# Altium schematic symbol library MTGW_R09.SCHLIB: 89 symbols
Pins are listed as number, name and electrical type; pins without a type are passive.

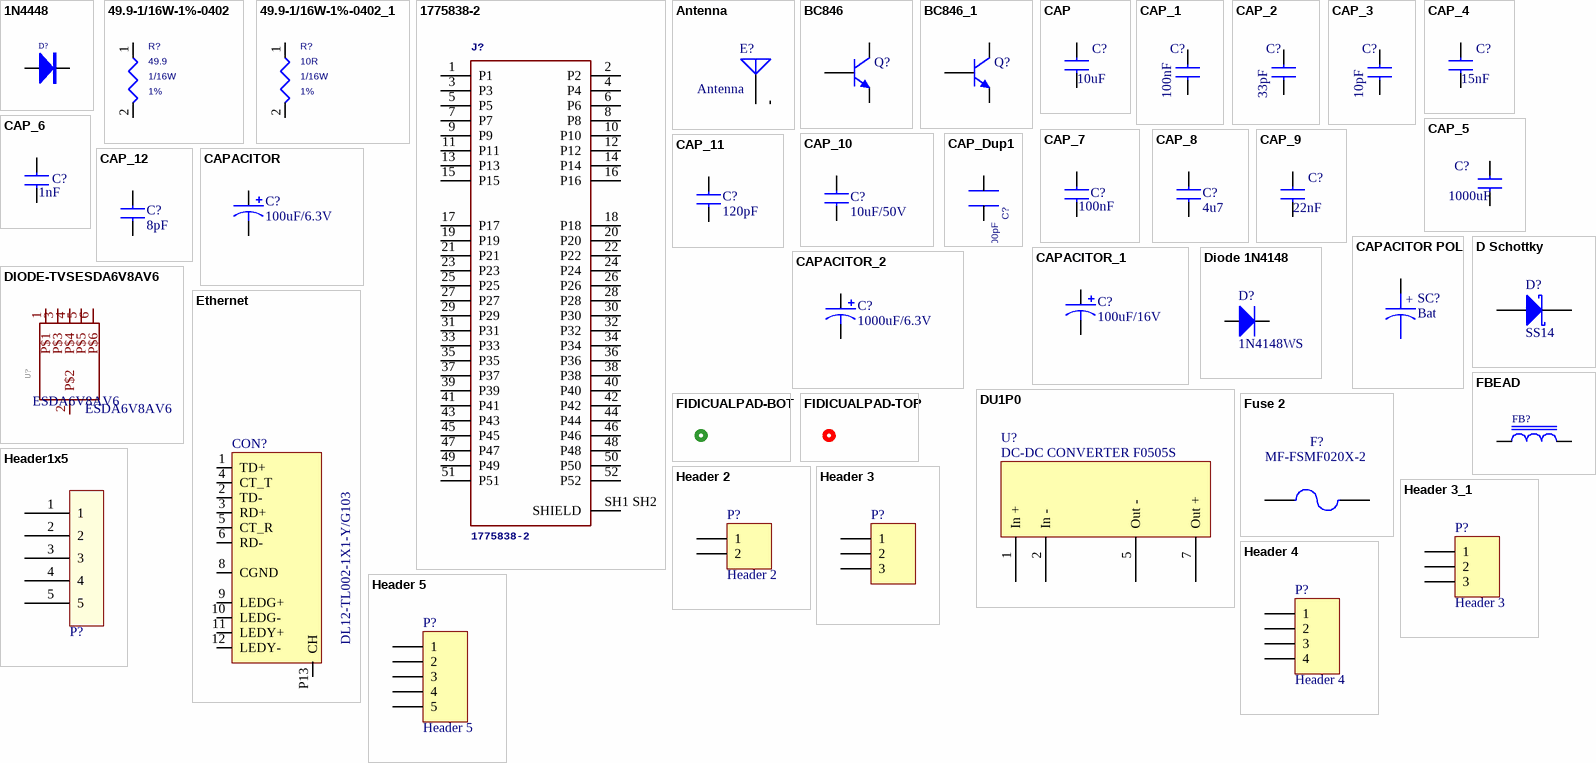
[diagram p0: symbols 1N4448 to Header 5]

## 1N4448
designator D?
Diode; Part Number: LL4148-HT; Unit: USD; Price: 0,01053; Ordering: https://www.ozdisan.com/guc-yari-iletkenleri/diyot-modul-diyot-dogrultucular/genel-amacli-diyotlar/LL4148-HT
simulation model 1N4448 (DIODE)
footprint MLL34
footprint DIOMELF3515M (Metal Electrode Face (MELF) Diode; Body 3.5 x 1.5 mm (LxDia))
pins: A, C K
1 alternate drawing of the same symbol

## 49.9-1/16W-1%-0402
designator R?, comment 49.9  Tolerance: 1%  Wattage: 1/16W
Part Number: 0603SAF499JT5E; Unit: USD; Ordering: https://www.ozdisan.com/pasif-komponentler/direncler/smt-smd-direncler/0603SAF499JT5E; Price: 0,00195
footprint RESC1608X84M (Chip Resistor, Body 1.6x0.8mm, IPC Low Density)
pins: 1, 2

## 49.9-1/16W-1%-0402_1
designator R?, comment 10R  Tolerance: 1%  Wattage: 1/16W
Part Number: 0603SAF100JT5E; Unit: USD; Ordering: https://www.ozdisan.com/pasif-komponentler/direncler/smt-smd-direncler/0603SAF100JT5E; Price: 0,00195
footprint RESC1608X84M (Chip Resistor, Body 1.6x0.8mm, IPC Low Density)
pins: 1, 2

## 1775838-2
designator J?
Conn Mini PCI Express Card Edge SKT 52 POS Solder RA SMD T/R; Part Number: 119A-70A00-R02; Unit: USD; Price: 0,91960; Ordering: https://www.ozdisan.com/konnektor-baglanti-elemanlari/card-edge-konnektorler/edgeboard-connectors/119A-70A00-R02
footprint TE_1775838-2
pins: 1 P1, 2 P2, 3 P3, 4 P4, 5 P5, 6 P6, 7 P7, 8 P8, 9 P9, 10 P10, 11 P11, 12 P12, 13 P13, 14 P14, 15 P15, 16 P16, 17 P17, 18 P18, 19 P19, 20 P20, 21 P21, 22 P22, 23 P23, 24 P24, 25 P25, 26 P26, 27 P27, 28 P28, 29 P29, 30 P30, 31 P31, 32 P32, 33 P33, 34 P34, 35 P35, 36 P36, 37 P37, 38 P38, 39 P39, 40 P40, 41 P41, 42 P42, 43 P43, 44 P44, 45 P45, 46 P46, 47 P47, 48 P48, 49 P49, 50 P50, 51 P51, 52 P52, SH1 SH2 SHIELD

## Antenna
designator E?
Generic Antenna; Part Number: DL-SMA002-B; Ordering: https://www.ozdisan.com/konnektor-baglanti-elemanlari/koaksiyel-konnektorler/sma-konnektor/L-KLS1-SMA002-B; Price: 0,84700
footprint SMA_ANTENNA
pins: 1 A, 2

## BC846
designator Q?, comment TR SMD BC846B SOT23 PHI  (value not drawn)
Part Number: BC846B,215; Unit: USD; Price: 0,01696; Ordering: https://www.ozdisan.com/guc-yari-iletkenleri/transistor/discrete-transistorler/BC846B215
simulation model BC848BLT1 (NPN)
signal-integrity model BC848BLT1
footprint SOT95P240X150-3M (SOT23, 3-Leads, Body 2.9x1.3mm, Pitch 0.95mm, Lead Span 2.5mm, IPC Low Density); pin to pad 1>B 2>E 3>C
3D model SOT-23 (PCB3D Model)
pins: 1 B, 2 E, 3 C

## BC846_1
designator Q?, comment TR SMD BC846B SOT23 PHI  (value not drawn)
General Purpose Transistor NPN Silicon; Part Number: BC846B,215; Unit: USD; Price: 0,01696; Ordering: https://www.ozdisan.com/guc-yari-iletkenleri/transistor/discrete-transistorler/BC846B215
simulation model BC848BLT1 (NPN)
signal-integrity model BC848BLT1
footprint SOT95P240X150-3M (SOT23, 3-Leads, Body 2.9x1.3mm, Pitch 0.95mm, Lead Span 2.5mm, IPC Low Density); pin to pad 1>B 2>E 3>C
3D model SOT-23 (PCB3D Model)
pins: 1 B, 2 E, 3 C

## CAP
designator C?, comment 10uF
Part Number: CL10A106KP8NNNC; Unit: USD; Price: 0,00484
footprint C0805
footprint CAPC1608X92M (Chip Capacitor, Body 1.6x0.92mm, IPC Low Density)
pins: 1, 2

## CAP_1
designator C?, comment 100nF
Part Number: CL10B104KB8NNNC; Unit: USD; Ordering: https://www.ozdisan.com/pasif-komponentler/kondansatorler/smd-kondansatorler-mlcc/CL10B104KB8NNNC; Price: 0,00484
footprint C0805
footprint CAPC1608X92M (Chip Capacitor, Body 1.6x0.92mm, IPC Low Density)
pins: 1, 2

## CAP_2
designator C?, comment 33pF
Part Number: CL10C330JB8NNNC; Unit: USD; Ordering: https://www.ozdisan.com/pasif-komponentler/kondansatorler/smd-kondansatorler-mlcc/CL10C330JB8NNNC; Price: 0,00484
footprint C0805
footprint CAPC1608X92M (Chip Capacitor, Body 1.6x0.92mm, IPC Low Density)
pins: 1, 2

## CAP_3
designator C?, comment 10pF
Part Number: CL10C100JB8NNNC; Unit: USD; Ordering: https://www.ozdisan.com/pasif-komponentler/kondansatorler/smd-kondansatorler-mlcc/CL10C100JB8NNNC; Price: 0,00484
footprint C0805
footprint CAPC1608X92M (Chip Capacitor, Body 1.6x0.92mm, IPC Low Density)
pins: 1, 2

## CAP_4
designator C?, comment 15nF
Part Number: CL10B153KB85PNC; Unit: USD; Ordering: https://www.ozdisan.com/pasif-komponentler/kondansatorler/smd-kondansatorler-mlcc/CL10B153KB85PNC; Price: 0,01220
footprint C0805
footprint CAPC1608X92M (Chip Capacitor, Body 1.6x0.92mm, IPC Low Density)
pins: 1, 2

## CAP_5
designator C?, comment 1000uF
CAP.EL.1000uF 6.3V 8x10.5 105C 2000Hrs SMD; Part Number: MRW-6R3V102MF105-T/R
footprint CAPAE8x8 (Chip Capacitor, Body 2.0x1.3mm, IPC Low Density)
pins: 1, 2

## CAP_6
designator C?, comment 1nF
Capacitor; Part Number: CL10B102KB8NNNC; Unit: USD; Ordering: https://www.ozdisan.com/pasif-komponentler/kondansatorler/smd-kondansatorler-mlcc/CL10B102KB8NNNC; Price: 0,00484
footprint C0805
footprint CAPC1608X92M (Chip Capacitor, Body 1.6x0.92mm, IPC Low Density)
pins: 1, 2

## CAP_7
designator C?, comment 100nF
Capacitor; Part Number: CL10B104KB8NNNC; Unit: USD; Ordering: https://www.ozdisan.com/pasif-komponentler/kondansatorler/smd-kondansatorler-mlcc/CL10B104KB8NNNC; Price: 0,00484
footprint C0805
footprint CAPC1608X92M (Chip Capacitor, Body 1.6x0.92mm, IPC Low Density)
pins: 1, 2

## CAP_8
designator C?, comment 4u7
Capacitor; Part Number: CL10A475KQ8NNNC; Unit: USD; Price: 0,01671; Ordering: https://www.ozdisan.com/pasif-komponentler/kondansatorler/smd-kondansatorler-mlcc/CL10A475KQ8NNNC
footprint 0603
footprint 0805
footprint CAPC1608X92M
pins: 1, 2

## CAP_9
designator C?, comment 22nF
Capacitor; Part Number: CL10B223KA8NNNC; Unit: USD; Ordering: https://www.ozdisan.com/pasif-komponentler/kondansatorler/smd-kondansatorler-mlcc/CL10B223KA8NNNC; Price: 0,00484
footprint C0805
footprint CAPC1608X92M (Chip Capacitor, Body 1.6x0.92mm, IPC Low Density)
pins: 1, 2

## CAP_10
designator C?, comment 10uF/50V
Capacitor; Part Number: CL31A106KBHNNNE; Unit: USD; Price: 0,15790; Ordering: https://www.ozdisan.com/pasif-komponentler/kondansatorler/smd-kondansatorler-mlcc/CL31A106KBHNNNE
footprint 0603
footprint 0805
footprint CAPC3216X170M
pins: 1, 2

## CAP_11
designator C?, comment 120pF
Capacitor; Part Number: CL10C121JB8NNND; Unit: USD; Ordering: https://www.ozdisan.com/pasif-komponentler/kondansatorler/smd-kondansatorler-mlcc/CL10C121JB8NNND; Price: 0,01040
footprint C0805
footprint CAPC1608X92M (Chip Capacitor, Body 1.6x0.92mm, IPC Low Density)
pins: 1, 2

## CAP_12
designator C?, comment 8pF
Capacitor; Part Number: CL10C080DB8NNNC; Unit: USD; Ordering: https://www.ozdisan.com/pasif-komponentler/kondansatorler/smd-kondansatorler-mlcc/CL10C080DB8NNNC; Price: 0,01183
footprint C0805
footprint CAPC1608X92M (Chip Capacitor, Body 1.6x0.92mm, IPC Low Density)
pins: 1, 2

## CAP_Dup1
designator C?, comment 1000pF
CAP CERAMIC 1000pF 2KV 10% X7R 1206; Part Number: CC1206KKX7RDBB102
footprint CAP0402N
footprint CAPC3216X170M
signal-integrity model Guessed Model (Capacitor Model Details Guessed by Setup Helper)
pins: 1, 2

## CAPACITOR
designator C?, comment 100uF/6.3V
Part Number: T491B107K006AT; Unit: USD; value: 100uF/6.3V; Ordering: https://www.ozdisan.com/pasif-komponentler/kondansatorler/tantal-kondansatorler/T491B107K006AT; Price: 0,20230
footprint A_SIZE
footprint CAPMP3528X210M-B CASE
pins: 1, 2

## CAPACITOR POL
designator SC?, comment Bat
Part Number: DS1092-04-B6P; Unit: USD; Price: 0,12857; Ordering: https://www.ozdisan.com/bataryalar/batarya-aksesuarlari/pil-yuvalari/DS1092-04-B6P
footprint DB1092
pins: 1, 2
text: +

## CAPACITOR_1
designator C?, comment 100uF/16V
Capacitor; Part Number: PKR1-016V101MC110-T/A5.0; Unit: USD; value: 100uF/16V; Ordering: https://www.ozdisan.com/pasif-komponentler/kondansatorler/aluminyum-kondansatorler/PKR1-016V101MC110-TA5-0; Price: 0,01928
footprint A_SIZE
footprint CAPPRD500W45D425H1000A (Capacitor, Electrolytic, Radial; Body 5 x 11.5 mm (Dia.xH typ); Pin Spacing 5 mm)
pins: 1, 2

## CAPACITOR_2
designator C?, comment 1000uF/6.3V
Capacitor; Part Number: PKRM-6R3V102MF120-T/A3.5; Unit: USD; value: 1000uF/6.3V; Price: 0,05
footprint A_SIZE
footprint CAPP8x12_3.5mm_yatay
pins: 1 2, 2 1

## D Schottky
designator D?, comment SS14
Schottky Diode; Part Number: SS14_R1_00001; Unit: USD; Price: 0,03989; Ordering: https://www.ozdisan.com/guc-yari-iletkenleri/diyot-modul-diyot-dogrultucular/schottky-diyotlar/SS14R100001
footprint DIOM5336X244M (DO-214-AC/SMA; 2 C-Bend Leads; Body 5.2 x 2.6 mm, inc. leads (LxW))
simulation model SKYDIODE (Diode)
signal-integrity model D Schottky
pins: A, C

## Diode 1N4148
designator D?, comment 1N4148WS
High Conductance Fast Diode; Part Number: 1N4148WS_R1_00001; Unit: USD; Price: 0,02074; Ordering: https://www.ozdisan.com/guc-yari-iletkenleri/diyot-modul-diyot-dogrultucular/genel-amacli-diyotlar/1N4148WSR100001
footprint SODFL250X110-2L (SODFL, 2-Leads, Body 1,30x2,50mm, IPC High Density)
pins: A, C
2 alternate drawings of the same symbol

## DIODE-TVSESDA6V8AV6
designator U?, comment ESDA6V8AV6
Unit: USD; Ordering: https://www.ozdisan.com/Product/Detail/528035/ESDA6V8AV6; Price: 0,15307; Part Number: ESDA6V8AV6
footprint SOTFL50P160X60-6N
pins: 1 P$1 (io), 2 P$2 (io), 3 P$3 (io), 4 P$4 (io), 5 P$5 (io), 6 P$6 (io)

## DU1P0
designator U?, comment DC-DC CONVERTER F0505S
PU1P0; Part Number: F0505S-1WR3; Unit: USD; Price: 1,61216
footprint F0505XT
footprint CONV600W50P254L1960H1060Q4_7A3
pins: 1 In +, 2 In -, 5 Out -, 7 Out +

## Ethernet
designator CON?, comment DL12-TL002-1X1-Y/G103
Unit: USD; Part Number: DL12-TL002-1X1-Y/G103; Ordering: https://www.ozdisan.com/konnektor-baglanti-elemanlari/moduler-konnektorler/modular-jack/L-KLS12-TL002-1X1-YG103; Price: 1,31505
footprint RJ-45_GEC
pins: 1 TD+, 2 TD-, 3 RD+, 4 CT_T, 5 CT_R, 6 RD-, 8 CGND, 9 LEDG+, 10 LEDG-, 11 LEDY+, 12 LEDY-, P13 CH

## FBEAD
designator FB?, comment BLM18PG221SN1D  (value not drawn)
FERIT BEAD; Unit: USD; value: BLM18PG221SN1D; Price: 0,01209; Ordering: https://www.ozdisan.com/pasif-komponentler/induktorler/ferrite-bead/BLM18PG221SN1D; Part Number: BLM18PG221SN1D
footprint MLL34
footprint INDC1608X95M (Chip Inductor, Body 3.2x1.6mm, IPC High Density)
pins: 1, 2

## FIDICUALPAD-BOT
designator FD?, comment Fiducial  (value not drawn)  (no BOM)
FIDICUALPAD-BOTTOM
footprint FID100X300_TOP_M (Footprint not found)
pins: FB

## FIDICUALPAD-TOP
designator FD?, comment Fiducial  (value not drawn)  (no BOM)
FIDICUALPAD-TOP
footprint FID100X300_TOP_M
pins: FT

## Fuse 2
designator F?, comment MF-FSMF020X-2
THERMISTOR PTC RESETTABLE FUSE 0603 200mA 9V SMT; Part Number: MF-FSMF020X-2
footprint CAPC1608X92M (Chip Capacitor, Body 1.6x0.92mm, IPC Low Density)
simulation model FUSE (Spice Subcircuit)
pins: 1, 2

## Header1x5
designator P?, comment 1x5  (value not drawn)  (no BOM)
Unit: USD
footprint HDRRA2W64P254_1X2_127X254X254A-con5
pins: 1, 2, 3, 4, 5

## Header 2
designator P?
Header, 2-Pin; Part Number: 2EDGRC-5.08-02P-14-00CH; Unit: USD; Ordering: https://www.ozdisan.com/Product/Index/829?sortOrder=priceSK_asc&ids=9985%3B379669%2C9715%3B362493%2C9693%3B362487&propIds=379669%2C362493%2C362487&groupIds=9985%2C9715%2C9693&inStock=true&IsNew=false&IsOpportunity=false; Price: 0,03550
signal-integrity model Connector
footprint KLM1220W100P508L1216H850Q2A
pins: 1, 2

## Header 3
designator P?
Header, 3-Pin; Part Number: 15EDGRC-3.81-03P-14-00SH; Unit: USD; Price: 0,07979; Ordering: https://www.ozdisan.com/konnektor-baglanti-elemanlari/klemensler/gecmeli-klemensler/15EDGRC-3-81-03P-14-00SH
signal-integrity model Connector
footprint KLM920W80P381L1130H725Q3A
pins: 1, 2, 3

## Header 3_1
designator P?, comment Header 3
Header, 3-Pin; Part Number: L-KLS1-207-1-03-S; Unit: USD; Price: 0,01040; Ordering: https://www.ozdisan.com/konnektor-baglanti-elemanlari/headers/pin-header/L-KLS1-207-1-03-S
footprint HDR1X3 (Connector; Header; 3 Position)
signal-integrity model Connector
pins: 1, 2, 3

## Header 4
designator P?
Header, 4-Pin; Part Number: 2EDGRC-5.08-04P-14-00CH; Unit: USD; Ordering: https://www.ozdisan.com/konnektor-baglanti-elemanlari/klemensler/gecmeli-klemensler/2EDGRC-5-08-04P-14-00CH; Price: 0,07088
footprint KLM1220W100P508L2232H850Q4A
signal-integrity model Connector
pins: 1, 2, 3, 4

## Header 5
designator P?
Header, 5-Pin; Part Number: 15EDGRC-3.81-05P-14-00SH; Unit: USD; Ordering: https://www.ozdisan.com/konnektor-baglanti-elemanlari/klemensler/gecmeli-klemensler/15EDGRC-3-81-05P-14-00SH; Price: 0,12524
footprint KLM920W80P381L1130H7255AQ
signal-integrity model Connector
pins: 1, 2, 3, 4, 5

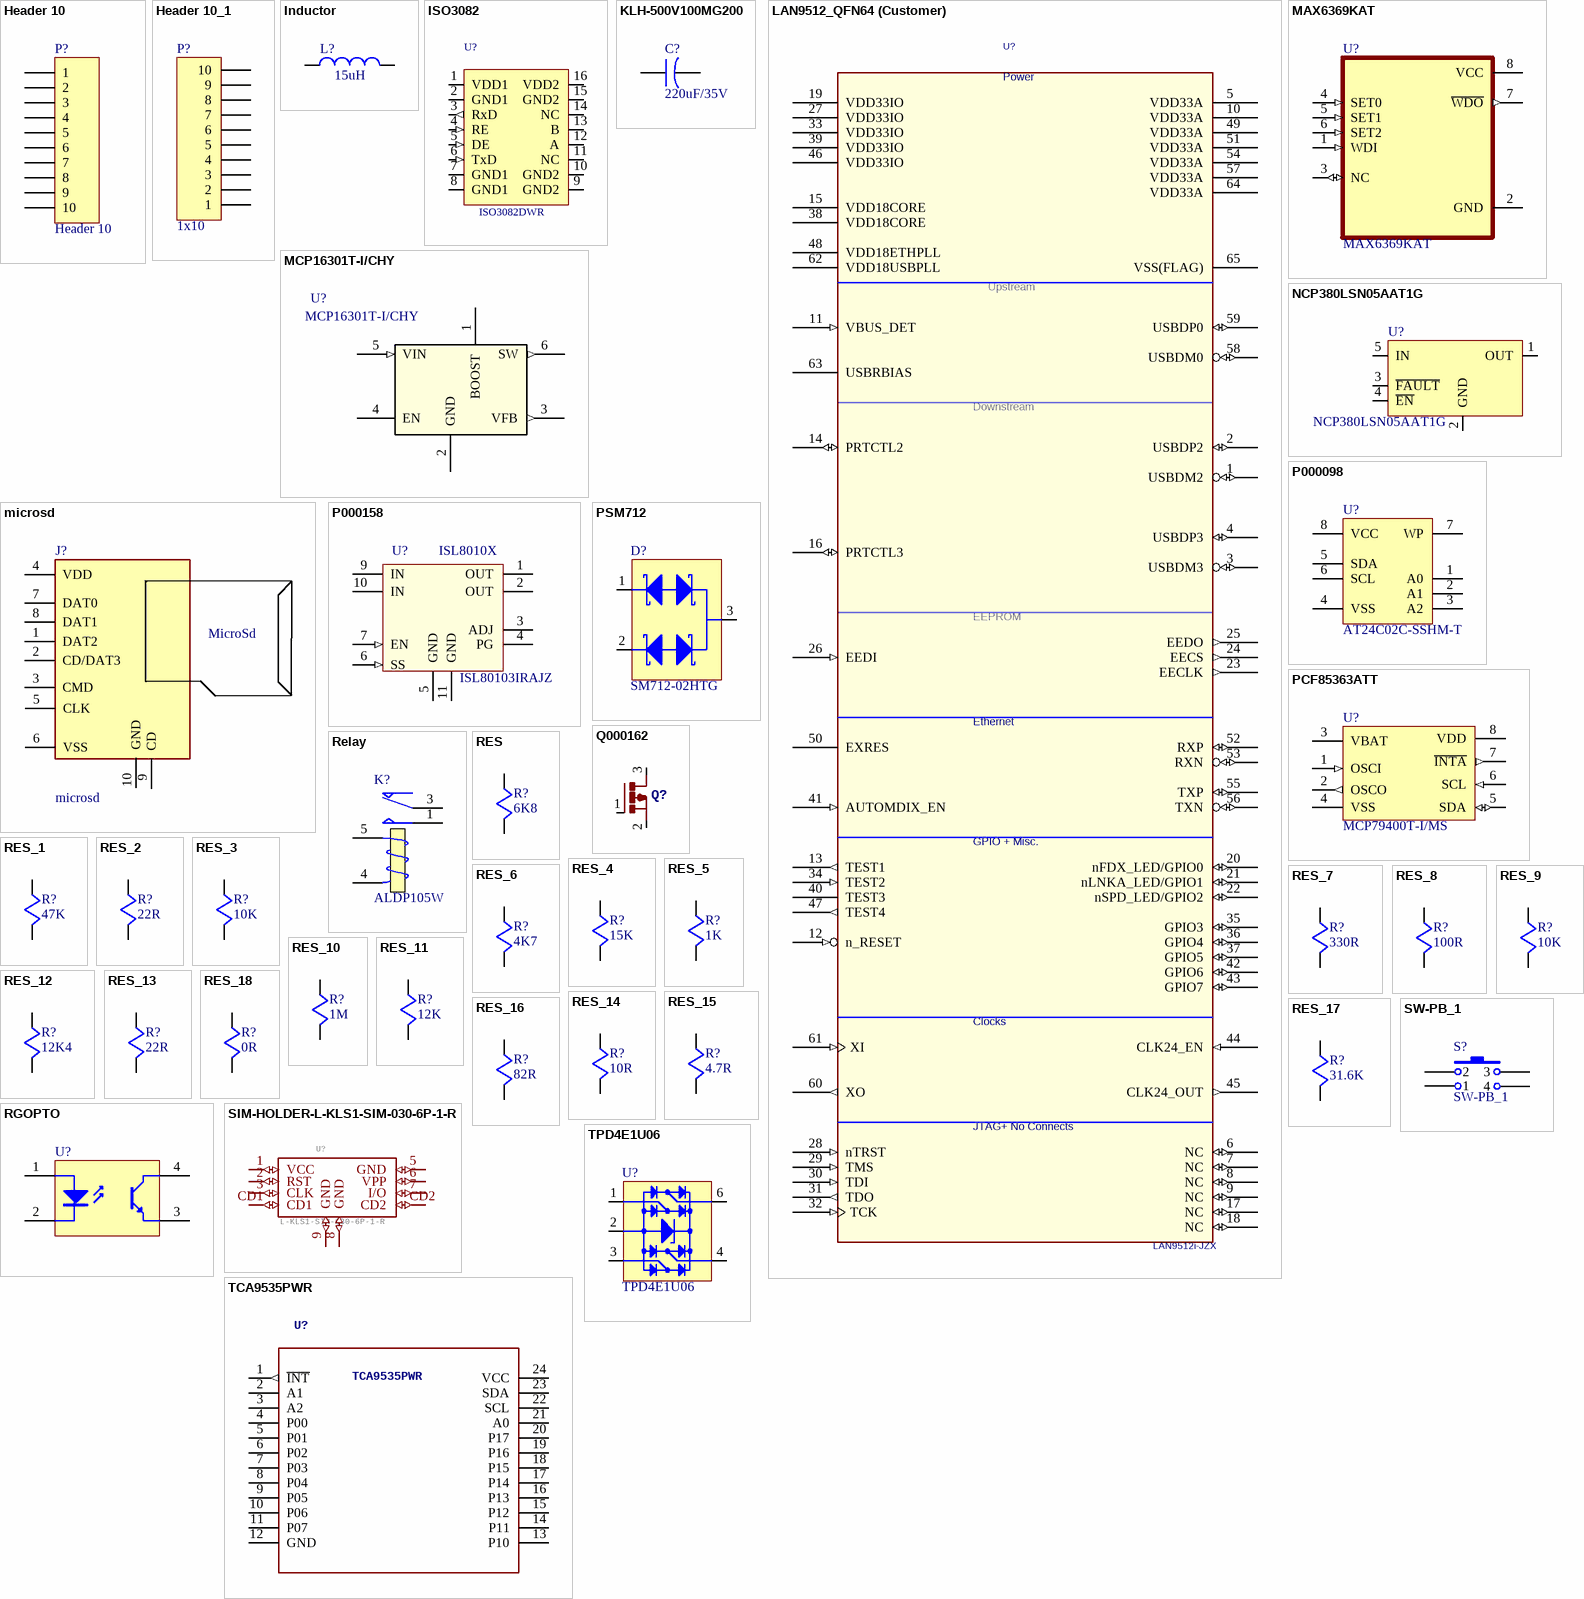
[diagram p1: symbols Header 10 to TPD4E1U06]

## Header 10
designator P?
Header, 10-Pin; Part Number: DS1002-01-1X10V13
footprint HDR1X10 (Connector; Header; 10 Position)
signal-integrity model Connector
pins: 1, 2, 3, 4, 5, 6, 7, 8, 9, 10

## Header 10_1
designator P?, comment 1x10  (no BOM)
Header, 10-Pin; Unit: USD
footprint HDRRA2W64P254_1X2_127X254X254A-con
signal-integrity model Connector
pins: 1, 2, 3, 4, 5, 6, 7, 8, 9, 10

## Inductor
designator L?  value 15uH
Inductor; Part Number: FPI0502-150M; Unit: USD; Price: 0,15307
simulation model INDUCTOR (Inductor)
signal-integrity model Inductor
footprint FPI0502
pins: 1, 2

## ISO3082
designator U?, comment ISO3082DWR
ISOLATED RS485 TRANSCEIVER; value: ISO3082DWR; Part Number: ISO3082DWR
footprint SOL-16
footprint SOIC127P1033X265-16M
pins: 1 VDD1 (power), 2 GND1 (io), 3 RxD (out), 4 RE (in), 5 DE (in), 6 TxD (in), 7 GND1 (io), 8 GND1 (io), 9 GND2 (io), 10 GND2 (io), 11 NC (io), 12 A (io), 13 B (io), 14 NC (io), 15 GND2 (io), 16 VDD2 (power)

## KLH-500V100MG200
designator C?, comment Capacitance: 220uF/35V  (hidden comment: PKR1-035V221MF115-TA5-0)
Unit: USD; Price: 0,03630; Ordering: https://www.ozdisan.com/pasif-komponentler/kondansatorler/aluminyum-kondansatorler/PKR1-035V221MF115-TA5-0; Part Number: PKR1-035V221MF115-TA5-0
footprint CAPPRD500W50D800H1200A
pins: 1 Positive, 2 Negaative

## LAN9512_QFN64 (Customer)
designator U?  Part Number: LAN9512i-JZX  (hidden comment: LAN9512_QFN64 (Customer))
Unit: USD; Ordering: https://www.digikey.com/product-detail/en/microchip-technology/LAN9512-JZX/638-1086-ND/2166038; Price: 4
footprint QFN50P900X900X100_HS-65N (QFN, 64-Leads, Body 9,00x9,00mm, Pitch 0,50mm, Thermal Pad 7,30x7,30mm, IPC Medium Density)
pins: 1 USBDM2 (io), 2 USBDP2 (io), 3 USBDM3 (io), 4 USBDP3 (io), 5 VDD33A (power), 6 NC (io), 7 NC (io), 8 NC (io), 9 NC (io), 10 VDD33A (power), 11 VBUS_DET (in), 12 n_RESET (in), 13 TEST1 (out), 14 PRTCTL2 (io), 15 VDD18CORE (power), 16 PRTCTL3 (io), 17 NC (io), 18 NC (io), 19 VDD33IO (power), 20 nFDX_LED/GPIO0 (io), 21 nLNKA_LED/GPIO1 (io), 22 nSPD_LED/GPIO2 (io), 23 EECLK (out), 24 EECS (out), 25 EEDO (out), 26 EEDI (in), 27 VDD33IO (power), 28 nTRST (in), 29 TMS (in), 30 TDI (in), 31 TDO (out), 32 TCK (in), 33 VDD33IO (power), 34 TEST2 (in), 35 GPIO3 (io), 36 GPIO4 (io), 37 GPIO5 (io), 38 VDD18CORE (power), 39 VDD33IO (power), 40 TEST3 (power), 41 AUTOMDIX_EN (in), 42 GPIO6 (io), 43 GPIO7 (io), 44 CLK24_EN (in), 45 CLK24_OUT (out), 46 VDD33IO (power), 47 TEST4 (out), 48 VDD18ETHPLL (power), 49 VDD33A (power), 50 EXRES, 51 VDD33A (power), 52 RXP (io), 53 RXN (io), 54 VDD33A (power), 55 TXP (io), 56 TXN (io), 57 VDD33A (power), 58 USBDM0 (io), 59 USBDP0 (io), 60 XO (out), 61 XI (in), 62 VDD18USBPLL (power), 63 USBRBIAS, 64 VDD33A (power), 65 VSS(FLAG) (power)
text: Power; Upstream; Downstream; EEPROM; Ethernet; GPIO + Misc.; Clocks; JTAG+ No Connects

## MAX6369KAT
designator U?
Supervisor Open Drain or Open Collector 1 Channel SOT-23-8; Part Number: MAX6369KA+
footprint SOT65P280X145-8N
pins: 1 WDI (in), 2 GND (power), 3 NC (io), 4 SET0 (in), 5 SET1 (in), 6 SET2 (in), 7 ~{WDO} (out), 8 VCC (power)

## MCP16301T-I/CHY
designator U?
No Description Available; Unit: USD; Price: 0,86520; Part Number: MCP16301T-I/CHY; Ordering: https://www.digikey.com/product-detail/en/microchip-technology/MCP16301T-I-CHY/MCP16301T-I-CHYCT-ND/2696163
footprint SOT95P280X145-6M (SOT23, 5-Leads, Body 3.00x1.60mm, Pitch 0.95mm, Lead Span 2.85mm, IPC Low Density)
pins: 1 BOOST, 2 GND (power), 3 VFB (out), 4 EN, 5 VIN (in), 6 SW (out)

## microsd
designator J?
Connector; Part Number: L-KLS1-TF-003-H1.85-R; Unit: USD; Price: 0,26439; Ordering: https://www.ozdisan.com/konnektor-baglanti-elemanlari/sim-sd-kart-konnektorleri/sd-kart-konnektorleri/L-KLS1-TF-003-H1-85-R
footprint microSD_2
pins: 1 DAT2, 2 CD/DAT3, 3 CMD, 4 VDD, 5 CLK, 6 VSS, 7 DAT0, 8 DAT1, 9 CD, 10 GND
text: MicroSd

## NCP380LSN05AAT1G
designator U?
Unit: USD; Ordering: https://www.digikey.com/product-detail/en/on-semiconductor/NCP380LSN05AAT1G/NCP380LSN05AAT1GOSCT-ND/2683271; Part Number: NCP380LSN05AAT1G; Price: 0,51600
footprint SOT95P280X110-5M (SOT23, 5-Leads, Body 3.00x1.60mm, Pitch 0.95mm, Lead Span 2.85mm, IPC Low Density)
pins: 1 OUT, 2 GND, 3 ~{FAULT}, 4 ~{EN}, 5 IN

## P000098
designator U?, comment Manufacturer Part Number: AT24C02C-SSHM-T  (hidden comment: AT24xx)
IC-24C02 EEPROM 2KBIT 1MHz 8SOIC; Manufacturer: Microchip Technology; Part Number: AT24C02C-SSHM-T; Supplier 1: Ozdisan; Supplier Part Number 1: AT24C02C-SSHM-T; Operating Temperature: -40°C ~ 85°C; Price: 0,17
footprint SO-8
pins: 1 A0, 2 A1, 3 A2, 4 VSS (power), 5 SDA, 6 SCL, 7 WP, 8 VCC (power)

## P000158
designator U?, comment ISL8010X  Part Number: ISL80103IRAJZ
LDO Voltage Regulators SNG 3A ADJVVOUTLDO 3X310LDDFNW/ANNEAL1; Part Number__: P000158; Manufacturer: Renesas / Intersil; Supplier 1: Mouser; Supplier Part Number 1: 968-ISL80103IRAJZ-TK; Operating Temperature: -40°C~+125°C; Price: 3,3
footprint DFN10_3X3
pins: 1 OUT, 2 OUT, 3 ADJ (power), 4 PG (power), 5 GND (power), 6 SS (in), 7 EN (in), 9 IN (power), 10 IN (power), 11 GND (power)

## PCF85363ATT
designator U?, comment MCP79400T-I/MS
RTC; Unit: USD; Part Number: MCP79400T-I/MS; Price: 0,64573
footprint SOP65P490X110-8N
pins: 1 OSCI (in), 2 OSCO (out), 3 VBAT (power), 4 VSS (power), 5 SDA (io), 6 SCL (in), 7 ~{INTA} (out), 8 VDD (power)

## PSM712
designator D?, comment SM712-02HTG
Schottky Barrier Double Diode; Unit: USD; Price: 0,11431; Ordering: https://www.ozdisan.com/guc-yari-iletkenleri/diyot-modul-diyot-dogrultucular/tvs-diyotlar/SM712-02HTG; Part Number: SM712-02HTG
footprint SOT95P240X150-123-3M (SOT23, 3-Leads, Body 2.9x1.3mm, Pitch 0.95mm, Lead Span 2.5mm, IPC Low Density)
footprint SOT23_M (SOT23, 3-Leads, Body 2.9x1.3mm, Pitch 0.95mm, Lead Span 2.3mm, IPC Low Density)
footprint SOT23_N (SOT23, 3-Leads, Body 2.9x1.3mm, Pitch 0.95mm, Lead Span 2.3mm, IPC Medium Density)
pins: 1 K1, 2 A, 3 K2

## Q000162
designator Q?, comment MOSFET_P_GSD  (value not drawn)
MOSFET DIS.4A 20V P-CH SOT23 ENHANCEMENT SMT; Part Number: PJA3415_R1_00001; Manufacturer: Panjit; FET Type: MOSFET P-Channel, Metal Oxide; FET Feature: Standard; Current - Continuous Drain (Id) @ 25°C: 4A; Rds On (Max) @ Id, Vgs: 50 mOhm @ 4A, 4.5V; Vgs(th) (Max) @ Id: 0.6V @0.25mA; Gate Charge (Qg) @ Vgs: 20nC @ 4.5V; Input Capacitance (Ciss) @ Vds: 763pF @25V; Power - Max: 1.25W; Supplier 1: Ozdisan; Supplier Part Number 1: PJA3415_R1_00001; Manufacturer Part Number: PJA3415_R1_00001; Drain to Source Voltage (Vdss): 20V; Operating Temperature: -55°C ~ 150°C (TJ); Price: 0,1018
footprint SOT-23-3
pins: 1 G, 2 S, 3 D

## Relay
designator K?, comment ALDP105W
SPDT Relay; Unit: USD; Price: 0,41870; Part Number: ALDP105W
simulation model SPDTRELAY (Spice Subcircuit)
footprint RELAY_ALDP
pins: 1 NO, 3 COM, 4 T2, 5 T1

## RES
designator R?, comment 6K8
Part Number: 0603SAF6801T5E; Unit: USD; Ordering: https://www.ozdisan.com/pasif-komponentler/direncler/smt-smd-direncler/0603SAF6801T5E; Price: 0,00130
footprint 0603
footprint RESC1608X84M
footprint RESC3216X65M
pins: 1, 2
1 alternate drawing of the same symbol

## RES_1
designator R?, comment 47K
Part Number: 0603SAF4702T5E; Unit: USD; Ordering: https://www.ozdisan.com/pasif-komponentler/direncler/smt-smd-direncler/0603SAF4702T5E; Price: 0,00221
footprint 0603
footprint RESC1608X84M
footprint RESC3216X65M
pins: 1, 2
1 alternate drawing of the same symbol

## RES_2
designator R?, comment 22R
Part Number: 0603SAJ0220T5E; Unit: USD; Ordering: https://www.ozdisan.com/pasif-komponentler/direncler/smt-smd-direncler/0603SAJ0220T5E; Price: 0,00130
footprint 0603
footprint RESC1608X84M
footprint RESC3216X65M
pins: 1, 2
1 alternate drawing of the same symbol

## RES_3
designator R?, comment 10K
Part Number: 0603SAJ0103T5E; Unit: USD; Ordering: https://www.ozdisan.com/pasif-komponentler/direncler/smt-smd-direncler/0603SAJ0103T5E; Price: 0,00182
footprint 0603
footprint RESC1608X84M
footprint RESC3216X65M
pins: 1, 2
1 alternate drawing of the same symbol

## RES_4
designator R?, comment 15K
Part Number: 0603SAJ0153T5E; Unit: USD; Ordering: https://www.ozdisan.com/pasif-komponentler/direncler/smt-smd-direncler/0603SAJ0153T5E; Price: 0,00156
footprint 0603
footprint RESC1608X84M
footprint RESC3216X65M
pins: 1, 2
1 alternate drawing of the same symbol

## RES_5
designator R?, comment 1K
Resistor; Part Number: 0603SAJ0102T5E; Unit: USD; Ordering: https://www.ozdisan.com/pasif-komponentler/direncler/smt-smd-direncler/0603SAJ0102T5E; Price: 0,00182
footprint 0603
footprint RESC1608X84M
footprint RESC3216X65M
pins: 1, 2
1 alternate drawing of the same symbol

## RES_6
designator R?, comment 4K7
Resistor; Part Number: 1206S4J0472T5E; Unit: USD; Ordering: https://www.ozdisan.com/Product/Index/107?sortOrder=priceSK_asc&ids=9695%3B452011&propIds=452011&groupIds=9695&IsNew=false&IsOpportunity=false&SearchText=4.7k; Price: 0,00320
footprint RESC3216X65M
pins: 1, 2
1 alternate drawing of the same symbol

## RES_7
designator R?, comment 330R
Resistor; Part Number: 0603SAJ0331T5E; Unit: USD; Ordering: https://www.ozdisan.com/pasif-komponentler/direncler/smt-smd-direncler/0603SAJ0331T5E; Price: 0,00182
footprint 0603
footprint RESC1608X84M
footprint RESC3216X65M
pins: 1, 2
1 alternate drawing of the same symbol

## RES_8
designator R?, comment 100R
Resistor; Part Number: 0603SAJ0101T5E; Unit: USD; Ordering: https://www.ozdisan.com/pasif-komponentler/direncler/smt-smd-direncler/0603SAJ0101T5E; Price: 0,00182
footprint 0603
footprint RESC1608X84M
footprint RESC3216X65M
pins: 1, 2
1 alternate drawing of the same symbol

## RES_9
designator R?, comment 10K
Resistor; Part Number: 0603SAJ0103T5E; Unit: USD; Ordering: https://www.ozdisan.com/pasif-komponentler/direncler/smt-smd-direncler/0603SAJ0103T5E; Price: 0,00182
footprint 0603
footprint RESC1608X84M
footprint RESC3216X65M
pins: 1, 2
1 alternate drawing of the same symbol

## RES_10
designator R?, comment 1M
Resistor; Part Number: 0603SAF1004T5E; Unit: USD; Ordering: https://www.ozdisan.com/pasif-komponentler/direncler/smt-smd-direncler/0603SAF1004T5E; Price: 0,00195
footprint 0603
footprint RESC1608X84M
footprint RESC3216X65M
pins: 1, 2
1 alternate drawing of the same symbol

## RES_11
designator R?, comment 12K
Resistor; Part Number: 0603SAF1202T5E; Unit: USD; Ordering: https://www.ozdisan.com/pasif-komponentler/direncler/smt-smd-direncler/0603SAF1202T5E; Price: 0,00195
footprint 0603
footprint RESC1608X84M
footprint RESC3216X65M
pins: 1, 2
1 alternate drawing of the same symbol

## RES_12
designator R?, comment 12K4
Resistor; Part Number: CRCW060312K4FKEB; Unit: USD; Ordering: https://www.ozdisan.com/pasif-komponentler/direncler/smt-smd-direncler/CRCW060312K4FKEB; Price: 0,01244
footprint 0603
footprint RESC1608X84M
footprint RESC3216X65M
pins: 1, 2
1 alternate drawing of the same symbol

## RES_13
designator R?, comment 22R
Resistor; Part Number: 0603SAJ0220T5E; Unit: USD; Ordering: https://www.ozdisan.com/pasif-komponentler/direncler/smt-smd-direncler/0603SAJ0220T5E; Price: 0,00130
footprint 0603
footprint RESC1608X84M
footprint RESC3216X65M
pins: 1, 2
1 alternate drawing of the same symbol

## RES_14
designator R?, comment 10R
Resistor; Part Number: 0603SAF100JT5E; Unit: USD; Price: 0,00182
footprint 0603
footprint RESC1608X84M
footprint RESC3216X65M
pins: 1, 2
1 alternate drawing of the same symbol

## RES_15
designator R?, comment 4.7R
Resistor; Part Number: 0603SAF470KT5E; Unit: USD; Ordering: https://www.ozdisan.com/pasif-komponentler/direncler/smt-smd-direncler/0603SAF470KT5E; Price: 0,00247
footprint 0603
footprint RESC1608X84M
footprint RESC3216X65M
pins: 1, 2
1 alternate drawing of the same symbol

## RES_16
designator R?, comment 82R
Resistor; Part Number: 0603SAF820JT5E; Unit: USD; Ordering: https://www.ozdisan.com/pasif-komponentler/direncler/smt-smd-direncler/0603SAF820JT5E; Price: 0,00195
footprint 0603
footprint RESC1608X84M
footprint RESC3216X65M
pins: 1, 2
1 alternate drawing of the same symbol

## RES_17
designator R?, comment 31.6K
Resistor; Part Number: 0603SAF3162T5E; Unit: USD; Ordering: https://www.ozdisan.com/pasif-komponentler/direncler/smt-smd-direncler/0603SAF3162T5E; Price: 0,00169
footprint 0603
footprint RESC1608X84M
footprint RESC3216X65M
pins: 1, 2
1 alternate drawing of the same symbol

## RES_18
designator R?, comment 0R
Resistor; Part Number: 0603SAJ0000TDE; Unit: USD; Price: 0,00182
footprint 0603
footprint RESC1608X84M
footprint RESC3216X65M
pins: 1, 2
1 alternate drawing of the same symbol

## RGOPTO
designator U?
Optoisolator; Part Number: IS181GB; Unit: USD; Ordering: https://www.ozdisan.com/optolar-ve-sensorler/optolar/transistor-cikisli-optokuplorler/IS181GB; Price: 0,12524
footprint DIP4
footprint SO-4
footprint SOP(MF)254P700X200-4M
pins: 1 A, 2 K, 3 C, 4 E

## SIM-HOLDER-L-KLS1-SIM-030-6P-1-R
designator U?  (value not drawn)
Unit: USD; Ordering: https://www.ozdisan.com/Product/Detail/582667/L-KLS1-SIM-030-6P-1-R; Part Number: L-KLS1-SIM-030-6P; Price: 0,61226; L-KLS1-SIM-030-6P-1-R: L-KLS1-SIM-030-6P-1-R
footprint L-KLS1-SIM-030-6P-1-R
pins: 1 VCC (io), 2 RST (io), 3 CLK (io), 5 GND (io), 6 VPP (io), 7 I/O (io), 8 GND (io), 9 GND (io), CD1 (io), CD2 (io)

## SW-PB_1
designator S?
Switch; Part Number: TC-0203T-A00; Unit: USD; Published: 24-Mar-1999; Ordering: https://www.ozdisan.com/elektromekanik-komponentler/sivicler-anahtarlar/tact-sivicler/TC-0203T-A00; Publisher: Altium Limited; Price: 0,06795
footprint RA_TACT_SWITCH (TC-0203T-A00)
pins: 1, 2, 3, 4

## TCA9535PWR
designator U?
Unit: USD; Part Number: TCA9535PWR; Ordering: https://www.digikey.com/product-detail/en/texas-instruments/TCA9535PWR/296-25129-1-ND/2139130; Price: 1,04240
footprint SOP65P640X110-24M
pins: 1 ~{INT} (out), 2 A1, 3 A2, 4 P00, 5 P01, 6 P02, 7 P03, 8 P04, 9 P05, 10 P06, 11 P07, 12 GND (power), 13 P10, 14 P11, 15 P12, 16 P13, 17 P14, 18 P15, 19 P16, 20 P17, 21 A0, 22 SCL, 23 SDA, 24 VCC (power)

## TPD4E1U06
designator U?
Part Number: TPD4E1U06DBVR; Unit: USD; Price: 0,21436; Ordering: https://www.ozdisan.com/guc-yari-iletkenleri/diyot-modul-diyot-dogrultucular/tvs-diyotlar/TPD4E1U06DBVR
footprint LLP75-6L (TVS)
footprint SOT95P280X145-6M (SOT23, 5-Leads, Body 3.00x1.60mm, Pitch 0.95mm, Lead Span 2.85mm, IPC Low Density)
pins: 1 A1, 2 K, 3 A2, 4 A3, 6 A5

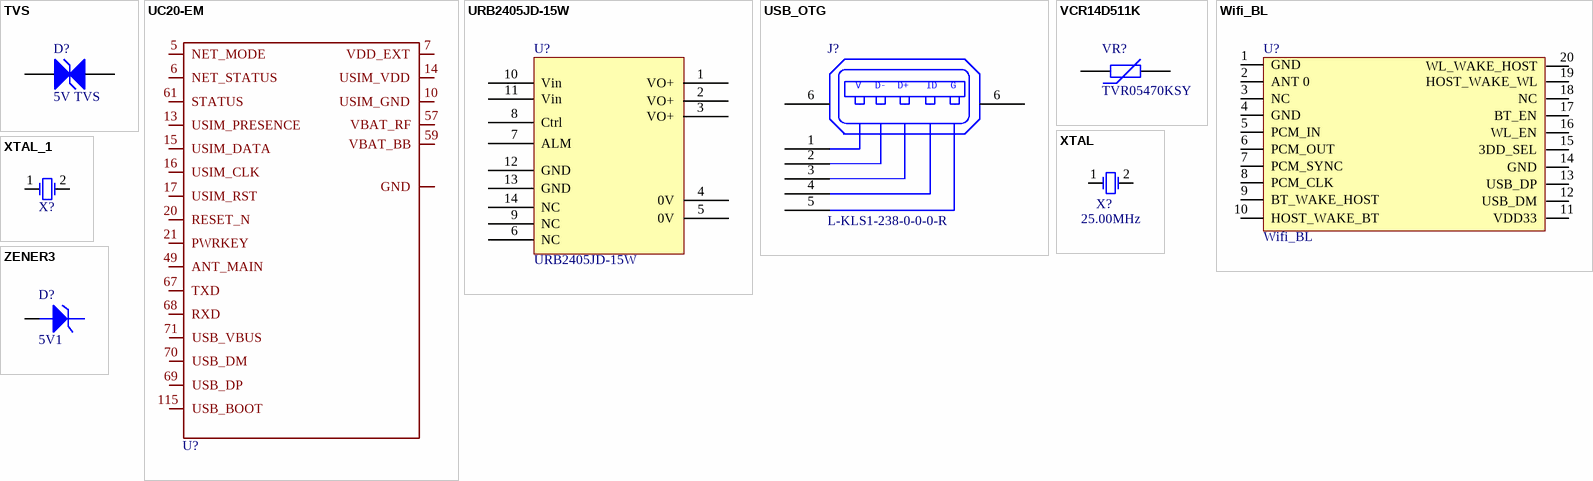
[diagram p2: symbols TVS to ZENER3]

## TVS
designator D?, comment 5V TVS
TVS; Part Number: P4SMAJ5.0CA_R2_00001; Unit: USD; Ordering: https://img.ozdisan.com/ETicaret_Dosya/351683_2799731.pdf; Price: 0,09394
footprint tvs
simulation model ZENER (Diode)
signal-integrity model D Zener
footprint R-vertical
footprint d-vertical
footprint 1812LF -W
footprint TVS-A (Footprint not found)
footprint DIOM5436X230M-Bi-directional
pins: 1 A, 2 K

## UC20-EM
designator U?  (value not drawn)
Part Number: UC200T; Unit: USD; Ordering: *; Price: 10
footprint UC20-EM
pins: 5 NET_MODE (io), 6 NET_STATUS (io), 7 VDD_EXT (io), 8 GND (power), 9 GND (power), 10 USIM_GND (io), 13 USIM_PRESENCE (io), 14 USIM_VDD (io), 15 USIM_DATA (io), 16 USIM_CLK (io), 17 USIM_RST (io), 19 GND (power), 20 RESET_N (io), 21 PWRKEY (io), 22 GND (power), 36 GND (power), 46 GND (power), 48 GND (power), 49 ANT_MAIN (io), 50 GND (power), 51 GND (power), 52 GND (power), 53 GND (power), 54 GND (power), 56 GND (power), 57 VBAT_RF (io), 58 VBAT_RF (io), 59 VBAT_BB (io), 60 VBAT_BB (io), 61 STATUS (io), 67 TXD (io), 68 RXD (io), 69 USB_DP (io), 70 USB_DM (io), 71 USB_VBUS (io), 72 GND (power), 85 GND (power), 86 GND (power), 87 GND (power), 88 GND (power), 89 GND (power), 90 GND (power), 91 GND (power), 92 GND (power), 93 GND (power), 94 GND (power), 95 GND (power), 96 GND (power), 97 GND (power), 98 GND (power), 99 GND (power), 100 GND (power), 101 GND (power), 102 GND (power), 103 GND (power), 104 GND (power), 105 GND (power), 106 GND (power), 107 GND (power), 108 GND (power), 109 GND (power), 110 GND (power), 111 GND (power), 112 GND (power), 115 USB_BOOT (io)

## URB2405JD-15W
designator U?
Unit: USD; Part Number: URB2405JD-15W
footprint URB_JD-15W
pins: 1 VO+, 2 VO+, 3 VO+, 4 0V, 5 0V, 6 NC, 7 ALM, 8 Ctrl, 9 NC, 10 Vin, 11 Vin, 12 GND, 13 GND, 14 NC

## USB_OTG
designator J?  Part Number: L-KLS1-238-0-0-0-R
Unit: USD; Ordering: https://www.ozdisan.com/konnektor-baglanti-elemanlari/usb-dvi-hdmi-konnektorler/usb-konnektorler/L-KLS1-238-0-0-0-R; Price: 0,13754
footprint USB_OTG
pins: 1 VCC, 2 DATA-, 3 DATA+, 4 ID,, 5 GND, 6 SGND1, 6 SGND2
text: V; D-; D+; ID; G

## VCR14D511K
designator VR?, comment TVR05470KSY
Unit: USD; Price: 0,04429; Ordering: https://www.ozdisan.com/guc-yari-iletkenleri/devre-koruyucu-komponentler/varistorler/TVR05470KSY; Part Number: TVR05470KSY
footprint VARRB860W80L1550T420H1630A
pins: 1, 2

## Wifi_BL
designator U?
Part Number: 6223E-UUD-3 or RL-UM02B-8723DU-V2.0; Ordering: proman; Unit: USD; Price: 3
footprint WIFI_BL
pins: 1 GND, 2 ANT 0, 3 NC, 4 GND, 5 PCM_IN, 6 PCM_OUT, 7 PCM_SYNC, 8 PCM_CLK, 9 BT_WAKE_HOST, 10 HOST_WAKE_BT, 11 VDD33, 12 USB_DM, 13 USB_DP, 14 GND, 15 3DD_SEL, 16 WL_EN, 17 BT_EN, 18 NC, 19 HOST_WAKE_WL, 20 WL_WAKE_HOST

## XTAL
designator X?, comment 25.00MHz
Crystal Oscillator; Part Number: AS-25.000-16-F-SMD; Unit: USD; Price: 0,11834; Ordering: https://www.ozdisan.com/pasif-komponentler/kristaller-osilatorler-rezanatorler/kristal/AS-25-000-16-F-SMD
footprint BCY-W2/D3.1
footprint AS-SMD
footprint XTAL1030X380X460M
pins: 1 OSC1, 2 OSC2
2 alternate drawings of the same symbol

## XTAL_1
designator X?, comment 32768Hz  (value not drawn)
Crystal Oscillator; Part Number: R38-32.768-12.5-EXT-5PPM; Unit: USD; Ordering: https://www.ozdisan.com/pasif-komponentler/kristaller-osilatorler-rezanatorler/kristal/R38-32-768-12-5-EXT-5PPM; Price: 0,12248
footprint BCY-W2/D3.1
footprint BCY-W2/E4.7
footprint RT4115
footprint XTALRD70W26D200H620A
pins: 1 OSC1, 2 OSC2
2 alternate drawings of the same symbol

## ZENER3
designator D?, comment 5V1
Zener Diode; Part Number: ZMM55C5V1_R1_10001; Unit: USD; Ordering: https://www.ozdisan.com/guc-yari-iletkenleri/diyot-modul-diyot-dogrultucular/zener-diyotlar/ZMM55C5V1R110001; Price: 0,02159
footprint MLL34T
footprint DIOMELF3515M
pins: A, C